# EAGLE library part FH12-24S-0.5SH_55 (library astra)
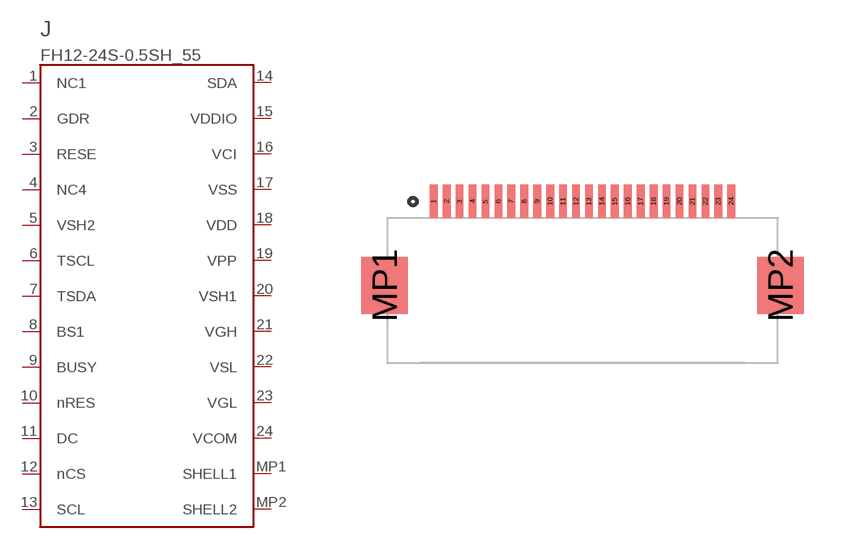
[diagram p9: symbol with the pads of FH12_24S_05SH; footprint FH12_24S_05SH]

Designator prefix J

## FH12-24S-0.5SH_55  [FH12_24S_05SH]
1  NC1  nc
2  GDR  pas
3  RESE  pas
4  NC4  nc
5  VSH2  pas
6  TSCL  pas
7  TSDA  pas
8  BS1  pas
9  BUSY  pas
10  nRES  pas
11  DC  pas
12  nCS  pas
13  SCL  pas
14  SDA  pas
15  VDDIO  pas
16  VCI  pas
17  VSS  pas
18  VDD  pas
19  VPP  pas
20  VSH1  pas
21  VGH  pas
22  VSL  pas
23  VGL  pas
24  VCOM  pas
MP1  SHELL1  pas
MP2  SHELL2  pas

## Footprint FH12_24S_05SH (pad centres in mm)
Hirose FH12 catalogue (drawing p4/lands p11, 24-way row A11.5/B17.1/C13.5). Pin 1 left with entry south. Body is plastic section; anchoring tabs extend to 16.1 mm overall.
smd 0.3 x 1.3: 1 -5.75,3.45; 2 -5.25,3.45; 3 -4.75,3.45; 4 -4.25,3.45; 5 -3.75,3.45; 6 -3.25,3.45; 7 -2.75,3.45; 8 -2.25,3.45; 9 -1.75,3.45; 10 -1.25,3.45; 11 -0.75,3.45; 12 -0.25,3.45; 13 0.25,3.45; 14 0.75,3.45; 15 1.25,3.45; 16 1.75,3.45; 17 2.25,3.45; 18 2.75,3.45; 19 3.25,3.45; 20 3.75,3.45; 21 4.25,3.45; 22 4.75,3.45; 23 5.25,3.45; 24 5.75,3.45
smd 1.8 x 2.2: MP1 -7.65,0.2; MP2 7.65,0.2